# Altium schematic symbol library TPH1R403NL_L1Q.SchLib: 1 symbol
Pins are listed as number, name and electrical type; pins without a type are passive.

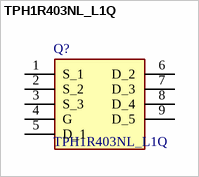
[diagram p0: symbol TPH1R403NL_L1Q]

## TPH1R403NL_L1Q
designator Q?
N-Channel 30 V 60A (Ta) 1.6W (Ta), 64W (Tc) Surface Mount 8-SOP Advance (5x5); Manufacturer_Name: Toshiba; Manufacturer_Part_Number: TPH1R403NL,L1Q; Geometry.Height: 1mm; Mouser Part Number: 757-TPH1R403NLL1Q; Mouser Price/Stock: https://www.mouser.co.uk/ProductDetail/Toshiba/TPH1R403NLL1Q?qs=HVbQlW5zcXWxPmEVdb2K1w%3D%3D; Arrow Part Number: TPH1R403NL,L1Q; Arrow Price/Stock: https://www.arrow.com/en/products/tph1r403nll1q/toshiba?utm_currency=USD&region=nac; Datasheet Link: https://www.mouser.in/ProductDetail/Toshiba/TPH1R403NLL1Q?qs=HVbQlW5zcXWxPmEVdb2K1w%3D%3D&srsltid=AfmBOoqRHMGlSDzUAlTxkWXR9G5-gdRWGcO8wnP1ZC8y2IEoxCRQZ0fW
footprint TPH1R403NLL1Q
pins: 1 S_1, 2 S_2, 3 S_3, 4 G, 5 D_1, 6 D_2, 7 D_3, 8 D_4, 9 D_5